# Altium footprint library Pcblib_Pamis.PcbLib: 7 footprints
Each footprint in its own frame and in the unit in brackets; x right, y up, seen from the top. Pads: shape width x height; smd on the part's side, far side on the other; paste and mask are expansions set on the pad; w line width, h text height; cw(c..) or ccw(c..) is an arc to the next point about the centre after c.
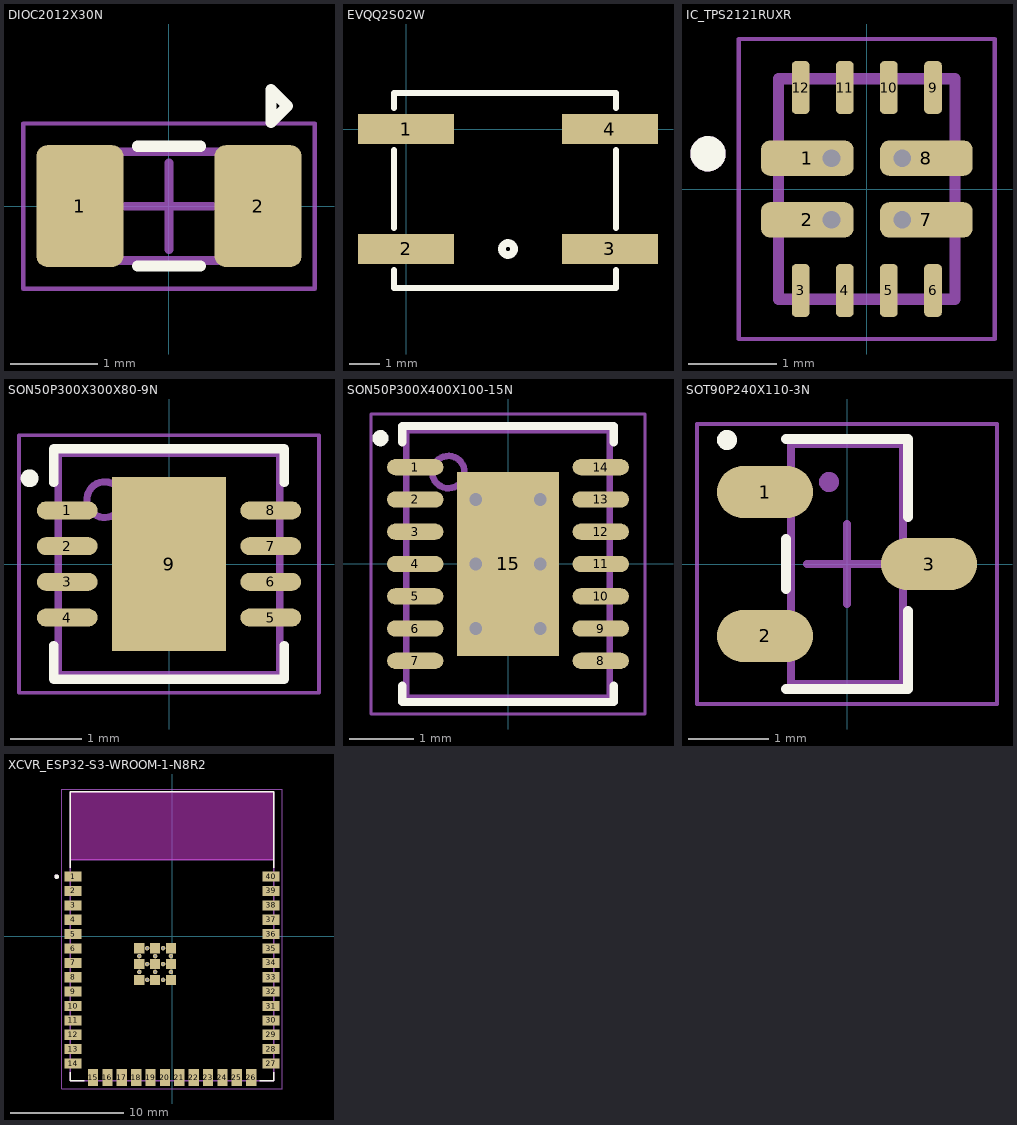
[diagram p0: the footprints below, top view; thin cyan lines are the x and y axes]

## DIOC2012X30N [mm] "Chip Diode, 2-Leads, Body 2,00x1,25mm, IPC Medium Density"
height 0.3
pads (2):
  rrect25% 1x1.4 smd: 1(-1.025,0) 2(1.025,0)
Top Overlay:
  lines w0.127: -0.362,-0.689 0.362,-0.689 ; -0.362,0.689 0.362,0.689 ; 1.172,0.964 1.362,1.154 1.172,1.343 1.172,0.964
Mechanical 13:
  rectangle: 0.731,-0.625 1,0.625
  lines w0.1: -1,-0.625 1,-0.625 1,0.625 -1,0.625 -1,-0.625
Mechanical 15:
  lines w0.05: -1.675,-0.95 1.675,-0.95 1.675,0.95 -1.675,0.95 -1.675,-0.95
  lines w0.1: -0.5,0 0.5,0 ; 0,-0.5 0,0.5
3D body "DIOC2012X30N.step": height 0.3, standoff 0, extent -1,-0.625 1,0.625

## EVQQ2S02W [mm]
pads (4):
  rect 3.2x1 smd: 1(0,0) 2(0,-4) 3(6.8,-4) 4(6.8,0)
Top Overlay:
  circle w0.254: c3.4,-4 r0.202
  lines w0.2: -0.4,-4.7 -0.4,-5.3 7,-5.3 7,-4.7 ; -0.4,-3.3 -0.4,-0.7 ; -0.4,0.7 -0.4,1.2 7,1.2 7,0.7 ; 7,-3.3 7,-0.7
3D body "28099.stp": height 2.51, standoff 0.01, extent -0.001,-5.083 6.605,1.016

## IC_TPS2121RUXR [mm]
pads (12):
  rrect50% 1.05x0.4 smd mask+0: 1(-0.675,0.35) 2(-0.675,-0.35) 7(0.675,-0.35) 8(0.675,0.35)
  rrect50% 0.2x0.6 smd mask+0: 3(-0.75,-1.15) 4(-0.25,-1.15) 5(0.25,-1.15) 6(0.75,-1.15) 9(0.75,1.15) 10(0.25,1.15) 11(-0.25,1.15) 12(-0.75,1.15)
via -0.4,-0.35 diameter 0.3 hole 0.2
via 0.4,-0.35 diameter 0.3 hole 0.2
via 0.4,0.35 diameter 0.3 hole 0.2
via -0.4,0.35 diameter 0.3 hole 0.2
Top Overlay:
  circle w0.2: c-1.8,0.4 r0.1
Top Solder:
  region: 1.25,-0.6 0.1,-0.6 0.1,-0.1 1.25,-0.1
  region: 0.9,0.8 0.6,0.8 0.6,1.5 0.9,1.5
  region: -0.6,0.8 -0.9,0.8 -0.9,1.5 -0.6,1.5
  region: 0.9,-1.5 0.6,-1.5 0.6,-0.8 0.9,-0.8
  region: -0.6,-1.5 -0.9,-1.5 -0.9,-0.8 -0.6,-0.8
  region: 0.4,-1.5 0.1,-1.5 0.1,-0.8 0.4,-0.8
  region: -0.1,-1.5 -0.4,-1.5 -0.4,-0.8 -0.1,-0.8
  region: 0.4,0.8 0.1,0.8 0.1,1.5 0.4,1.5
  region: -0.1,0.8 -0.4,0.8 -0.4,1.5 -0.1,1.5
  region: -0.1,-0.6 -1.25,-0.6 -1.25,-0.1 -0.1,-0.1
  region: 1.25,0.1 0.1,0.1 0.1,0.6 1.25,0.6
  region: -0.1,0.1 -1.25,0.1 -1.25,0.6 -0.1,0.6
Mechanical 13:
  circle w0.2: c-1.8,0.4 r0.1
  lines w0.127: -1,-1.25 1,-1.25 1,1.25 -1,1.25 -1,-1.25
Mechanical 15:
  lines w0.05: -1.45,-1.7 1.45,-1.7 1.45,1.7 -1.45,1.7 -1.45,-1.7
3D body "step_temp.STEP": height 1, standoff 0, extent -1,-1.25 1,1.25

## SON50P300X300X80-9N [mm] "SON, 8-Leads, Body 3,00x3,00mm, Pitch 0,50mm, Thermal Pad 2,44x1,60mm, IPC Medium Density"
height 0.8
pads (9):
  oval 0.85x0.25 smd: 1(-1.425,0.75) 2(-1.425,0.25) 3(-1.425,-0.25) 4(-1.425,-0.75) 5(1.425,-0.75) 6(1.425,-0.25) 7(1.425,0.25) 8(1.425,0.75)
  rect 1.6x2.44 smd paste-0.351: 9(0,0)
Top Overlay:
  circle w0.125: c-1.952,1.2 r0.062
  lines w0.127: -1.614,-1.138 -1.614,-1.613 1.613,-1.613 1.613,-1.138 ; -1.614,1.139 -1.614,1.614 1.613,1.614 1.613,1.139
Mechanical 13:
  circle w0.1: c-0.9,0.9 r0.25
  lines w0.1: -1.55,-1.55 1.55,-1.55 1.55,1.55 -1.55,1.55 -1.55,-1.55
Mechanical 15:
  lines w0.05: -2.1,-1.8 2.1,-1.8 2.1,1.8 -2.1,1.8 -2.1,-1.8
  lines w0.1: -0.5,0 0.5,0 ; 0,-0.5 0,0.5
3D body "SON50P300X300X80-9N.step": height 0.8, standoff 0, extent -1.57,-1.55 1.57,1.55

## SON50P300X400X100-15N [mm] "SON, 14-Leads, Body 4,00x3,00mm, Pitch 0,50mm, Thermal Pad 2,85x1,58mm, IPC Medium Density"
height 1
pads (15):
  oval 0.875x0.25 smd: 1(-1.438,1.5) 2(-1.438,1) 3(-1.438,0.5) 4(-1.438,0) 5(-1.438,-0.5) 6(-1.438,-1) 7(-1.438,-1.5) 8(1.438,-1.5) 9(1.438,-1) 10(1.438,-0.5) 11(1.438,0) 12(1.438,0.5) 13(1.438,1) 14(1.438,1.5)
  rect 1.58x2.85 smd paste-0.79: 15(0,0)
via -0.5,1 diameter 0.5 hole 0.2
via 0.5,1 diameter 0.5 hole 0.2
via -0.5,0 diameter 0.5 hole 0.2
via 0.5,0 diameter 0.5 hole 0.2
via -0.5,-1 diameter 0.5 hole 0.2
via 0.5,-1 diameter 0.5 hole 0.2
Top Overlay:
  circle w0.125: c-1.977,1.95 r0.062
  lines w0.127: -1.639,-1.889 -1.639,-2.138 1.639,-2.138 1.639,-1.889 ; -1.639,1.889 -1.639,2.138 1.639,2.138 1.639,1.889
Top Paste:
  rectangle: -0.474,0.158 0.474,1.109
  rectangle: -0.474,-1.109 0.474,-0.158
Mechanical 13:
  circle w0.1: c-0.925,1.425 r0.25
  lines w0.1: -1.575,-2.075 -1.575,2.075 1.575,2.075 1.575,-2.075 -1.575,-2.075
Mechanical 15:
  lines w0.05: -2.125,-2.325 -2.125,2.325 2.125,2.325 2.125,-2.325 -2.125,-2.325
  lines w0.1: -0.5,0 0.5,0 ; 0,-0.5 0,0.5
3D body "SON50P300X400X100-15N.step": height 1, standoff 0, extent -1.625,-2.075 1.625,2.075

## SOT90P240X110-3N [mm] "SOT23, 3-Leads, Body 2,90x2,40mm, Pitch 0,90mm, IPC Medium Density"
height 1.1
pads (3):
  oval 1.2x0.65 smd: 1(-1.025,0.9) 2(-1.025,-0.9) 3(1.025,0)
Top Overlay:
  circle w0.125: c-1.5,1.55 r0.062
  lines w0.127: -0.763,-1.563 0.764,-1.563 0.764,-0.589 ; -0.763,-0.311 -0.763,0.311 ; -0.763,1.563 0.764,1.563 0.764,0.589
Mechanical 13:
  circle w0.125: c-0.225,1.025 r0.062
  lines w0.1: -0.7,-1.5 0.7,-1.5 0.7,1.5 -0.7,1.5 -0.7,-1.5
Mechanical 15:
  lines w0.05: -1.875,-1.75 1.875,-1.75 1.875,1.75 -1.875,1.75 -1.875,-1.75
  lines w0.1: -0.5,0 0.5,0 ; 0,-0.5 0,0.5
3D body "SOT90P240X110-3N.step": height 1.1, standoff 0, extent -1.25,-1.5 1.25,1.5

## XCVR_ESP32-S3-WROOM-1-N8R2 [mm]
height 3.25
pads (61):
  rect 1.5x0.9 smd: 1(-8.75,5.26) 2(-8.75,3.99) 3(-8.75,2.72) 4(-8.75,1.45) 5(-8.75,0.18) 6(-8.75,-1.09) 7(-8.75,-2.36) 8(-8.75,-3.63) 9(-8.75,-4.9) 10(-8.75,-6.17) 11(-8.75,-7.44) 12(-8.75,-8.71) 13(-8.75,-9.98) 14(-8.75,-11.25) 27(8.75,-11.25) 28(8.75,-9.98) 29(8.75,-8.71) 30(8.75,-7.44) 31(8.75,-6.17) 32(8.75,-4.9) 33(8.75,-3.63) 34(8.75,-2.36) 35(8.75,-1.09) 36(8.75,0.18) 37(8.75,1.45) 38(8.75,2.72) 39(8.75,3.99) 40(8.75,5.26)
  rect 0.9x1.5 smd: 15(-6.985,-12.5) 16(-5.715,-12.5) 17(-4.445,-12.5) 18(-3.175,-12.5) 19(-1.905,-12.5) 20(-0.635,-12.5) 21(0.635,-12.5) 22(1.905,-12.5) 23(3.175,-12.5) 24(4.445,-12.5) 25(5.715,-12.5) 26(6.985,-12.5)
  rect 0.9x0.9 smd: 41_1(-1.5,-2.46) 41_2(-2.9,-2.46) 41_3(-0.1,-2.46) 41_4(-2.9,-3.86) 41_5(-1.5,-3.86) 41_6(-0.1,-3.86) 41_7(-2.9,-1.06) 41_8(-1.5,-1.06) 41_9(-0.1,-1.06)
  round 0.4 hole 0.2 mask+0: 41_10(-1.5,-1.76) 41_11(-2.9,-1.76) 41_12(-0.1,-1.76) 41_13(-2.9,-3.16) 41_14(-1.5,-3.16) 41_15(-0.1,-3.16) 41_16(-2.2,-1.06) 41_17(-0.8,-1.06) 41_18(-2.2,-2.46) 41_19(-0.8,-2.46) 41_20(-2.2,-3.86) 41_21(-0.8,-3.86)
Top Overlay:
  circle w0.2: c-10.2,5.26 r0.1
  lines w0.127: -9,-12.02 -9,-12.75 -7.755,-12.75 ; -9,6.03 -9,12.75 9,12.75 9,6.03 ; 7.755,-12.75 9,-12.75 9,-12.02
Keep-Out Layer:
  region: 9,6.75 -9,6.75 -9,12.75 9,12.75
  region: 9,6.75 -9,6.75 -9,12.75 9,12.75
Mechanical 13:
  circle w0.2: c-10.2,5.26 r0.1
  lines w0.127: -9,6.75 9,6.75 ; -9,6.75 -9,12.75 9,12.75 9,6.75 ; -9,6.75 -9,-12.75 9,-12.75 9,6.75
  text "ANTENNA" at -4.5,9.5 h1.27
Mechanical 15:
  lines w0.05: -9.75,-13.5 9.75,-13.5 9.75,13 -9.75,13 -9.75,-13.5
3D body "step_temp.STEP": height 3.25, standoff 0, extent -9,-12.75 9,12.75